# Altium footprint library Regulators.PcbLib: 16 footprints
Each footprint in its own frame and in the unit in brackets; x right, y up, seen from the top. Pads: shape width x height; smd on the part's side, far side on the other; paste and mask are expansions set on the pad; w line width, h text height; cw(c..) or ccw(c..) is an arc to the next point about the centre after c.
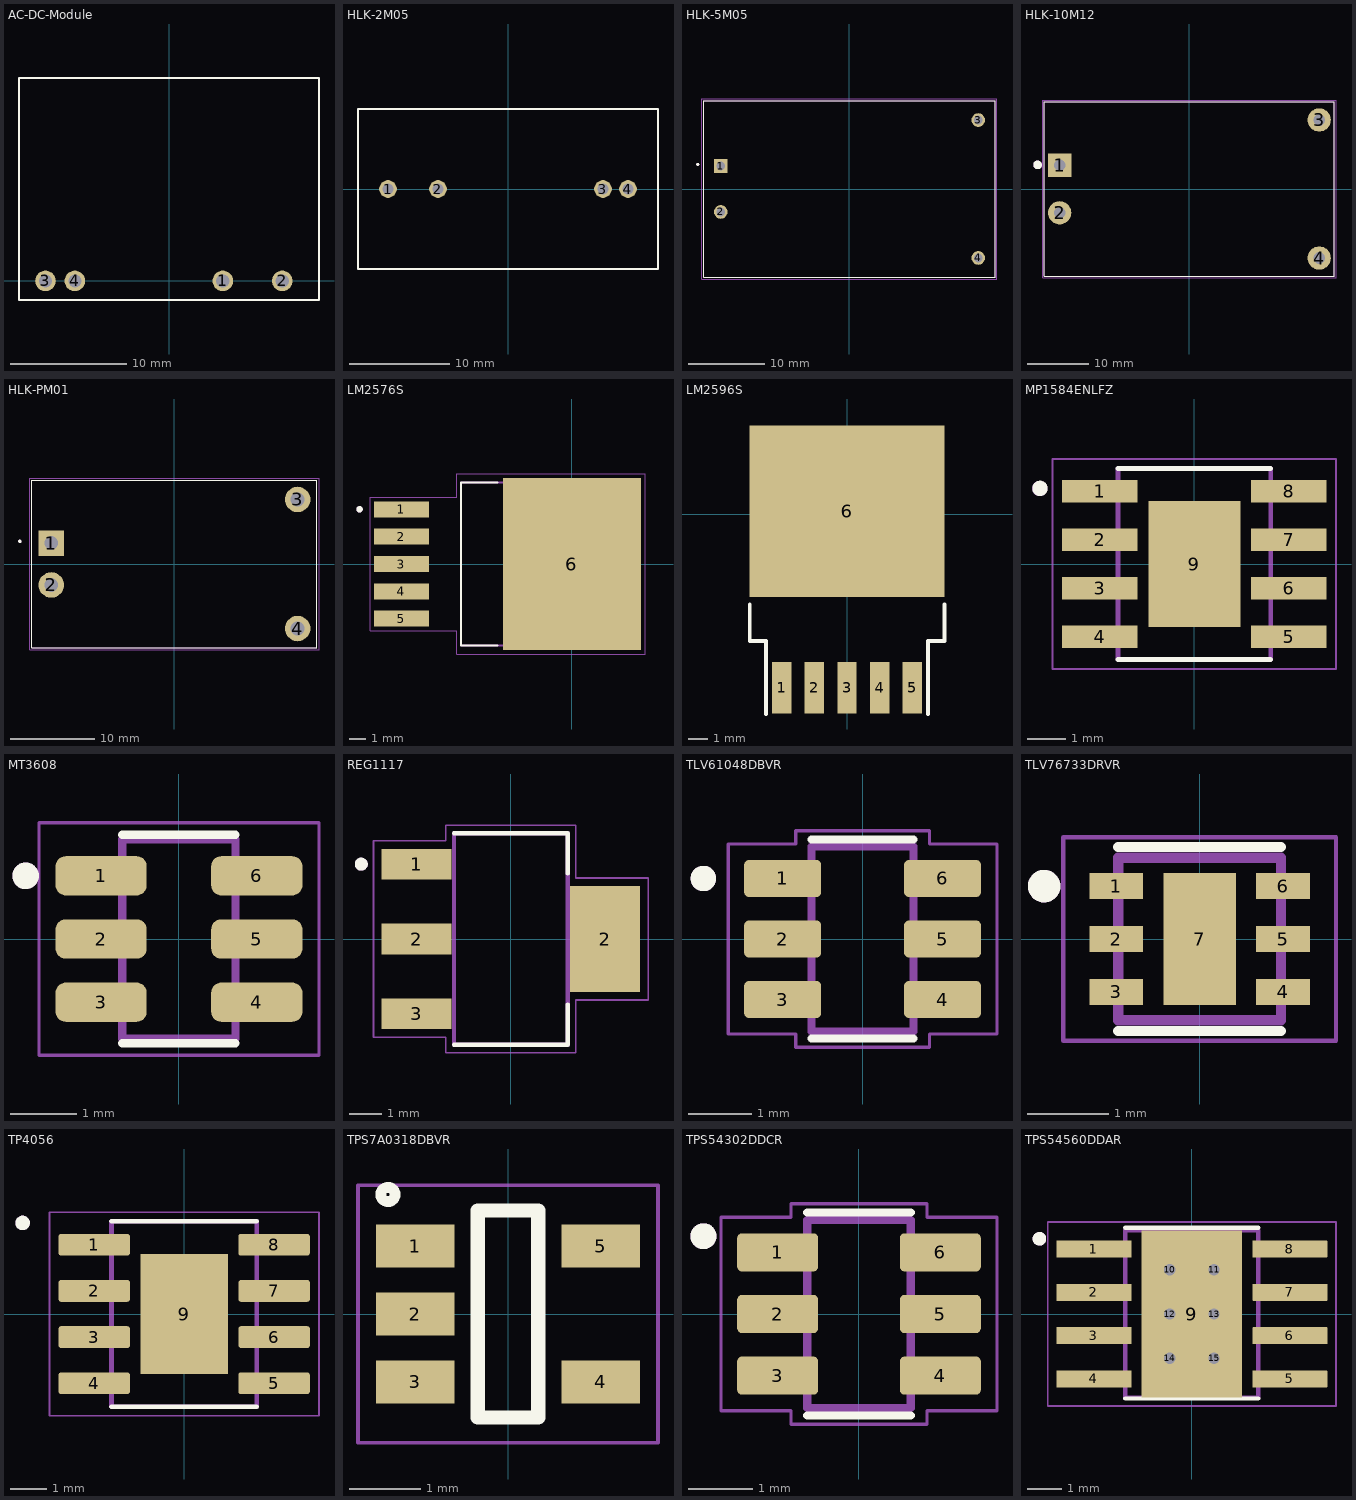
[diagram p0: the footprints below, top view; thin cyan lines are the x and y axes]

## AC-DC-Module [mil] "AC DC Module 12V 450mA - Type A"
pads (4):
  round 70 hole 45: 1(182.94,-0.08) 2(385,0) 3(-420,0) 4(-320,0)
Top Overlay:
  lines w7.87: -510,-65 510,-65 510,690 -510,690 -510,-65
3D body "WX-DC12003_.STEP": height 528.15, standoff 4.53, extent -494.75,-49.41 494.75,675

## HLK-2M05 [mil]
pads (4):
  round 70 hole 45: 1(-472.44,0) 2(-275.59,0) 3(374.02,0) 4(472.44,0)
Top Overlay:
  lines w7.87: -590.55,-314.96 -590.55,314.96 590.55,314.96 590.55,-314.96 -590.55,-314.96
3D body "HLK-2Mxx.step": height 748.03, standoff -196.85, extent -590.55,-315 590.55,314.92

## HLK-5M05 [mil]
pads (4):
  rect 70x70 hole 45: 1(-661.42,118.11)
  round 70 hole 45: 2(-661.42,-118.11) 3(661.42,354.33) 4(661.42,-354.33)
Top Overlay:
  circle w7.87: c-779.53,125.98 r3.94
  lines w5: -748.03,-452.76 748.03,-452.76 748.03,452.76 -748.03,452.76 -748.03,-452.76
Bottom Overlay:
  text "AC1" at -430,95 h60
  text "AC2" at -430,-145 h60
  text "VO-" at 590,325 h60
  text "VO+" at 590,-390 h60
Mechanical 13:
  circle w7.87: c-779.53,125.98 r3.94
  lines w5: -748.03,-452.76 -748.03,452.76 748.03,452.76 748.03,-452.76 -748.03,-452.76
Mechanical 15:
  lines w1.97: -757.87,-462.6 -757.87,462.6 757.87,462.6 757.87,-462.6 -757.87,-462.6
3D body "step_temp.STEP": height 709.51, standoff -196, extent -748.03,-452.76 748.03,452.76

## HLK-10M12 [mm]
height 22
pads (4):
  rect 3.81x3.81 hole 1.905: 1(-21.25,3.9)
  round 3.81 hole 1.905: 2(-21.25,-3.9) 3(21.25,11.3) 4(21.25,-11.3)
Top Overlay:
  circle w0.889: c-24.865,3.937 r0.254
  lines w0.127: -23.75,-14.25 -23.75,14.25 23.75,14.25 23.75,-14.25 -23.75,-14.25
Bottom Overlay:
  text "VO+" at 18.288,-12.192 h1.52
  text "VO-" at 18.288,10.668 h1.52
  text "AC2" at -14.351,-4.826 h1.52
  text "AC1" at -14.351,3.048 h1.52
Mechanical 13:
  circle w0.889: c-24.865,3.937 r0.254
  lines w0.127: -23.75,-14.25 -23.75,14.25 23.75,14.25 23.75,-14.25 -23.75,-14.25
Mechanical 15:
  lines w0.05: -24,-14.5 24,-14.5 24,14.5 -24,14.5 -24,-14.5
3D body "step_temp.STEP": height 22, standoff -5, extent -23.75,-14.25 23.75,14.25

## HLK-PM01 [mil] "HLK-PM01"
height 590.55
pads (4):
  rect 120x120 hole 65: 1(-578.74,98.43)
  round 120 hole 65: 2(-578.74,-98.43) 3(578.74,303.15) 4(578.74,-303.15)
Top Overlay:
  circle w7.87: c-726.39,106.3 r3.94
  lines w5: -669.29,-393.7 669.29,-393.7 669.29,393.7 -669.29,393.7 -669.29,-393.7
Bottom Overlay:
  text "VO+" at 480,-335 h60
  text "VO-" at 480,275 h60
  text "AC2" at -320,-125 h60
  text "AC1" at -320,70 h60
Mechanical 13:
  circle w7.87: c-726.39,106.3 r3.94
  lines w5: -669.29,-393.7 669.29,-393.7 669.29,393.7 -669.29,393.7 -669.29,-393.7
Mechanical 15:
  lines w1.97: -679.13,-403.54 679.13,-403.54 679.13,403.54 -679.13,403.54 -679.13,-403.54
3D body "step_temp.STEP": height 590.55, standoff -196.85, extent -669.29,-397.64 669.29,397.64

## LM2576S [mm] "LM2576S"
pads (6):
  rect 3.4x1 smd paste-0.05 mask+0.07: 1(-10.6,3.4) 2(-10.6,1.7) 3(-10.6,0) 4(-10.6,-1.7) 5(-10.6,-3.4)
  rect 8.6x10.7 smd paste-0.05 mask+0.07: 6(0,0)
Top Overlay:
  circle w0.2: c-13.2,3.4 r0.1
  lines w0.127: -4.62,-5.08 -6.905,-5.08 -6.905,5.08 -4.62,5.08
Mechanical 13:
  circle w0.2: c-13.2,3.4 r0.1
  lines w0.127: -6.905,-5.08 -6.905,5.08 2.02,5.08 2.02,-5.08 -6.905,-5.08
Mechanical 15:
  lines w0.05: -12.55,-4.15 -7.155,-4.15 -7.155,-5.6 4.55,-5.6 4.55,5.6 -7.155,5.6 -7.155,4.15 -12.55,4.15 -12.55,-4.15
3D body "step_temp.STEP": height 4.8, standoff 0, extent -10.986,-5.08 3.365,5.08

## LM2596S [mil] "TO170P1435X465-6N"
pads (6):
  rect 40x106 smd: 1(-134,-356) 2(-67,-356) 3(0,-356) 4(67,-356) 5(134,-356)
  rect 400x352 smd: 6(0,6)
Top Overlay:
  lines w8: -199.78,-185 -199.78,-260 -166.47,-260 -166.47,-410 ; 166.27,-410 166.27,-260 200,-260 200,-185
3D body "step_temp.STEP": height 183.07, standoff -5.91, extent -200,-382.48 200,182.48

## MP1584ENLFZ [mm] "SOIC127P600X170-9N"
pads (9):
  rect 1.97x0.6 smd: 1(-2.475,1.905) 2(-2.475,0.635) 3(-2.475,-0.635) 4(-2.475,-1.905) 5(2.475,-1.905) 6(2.475,-0.635) 7(2.475,0.635) 8(2.475,1.905)
  rect 2.41x3.3 smd paste-3: 9(0,0)
Top Overlay:
  circle w0.2: c-4.04,1.98 r0.1
  lines w0.127: -2,-2.5 2,-2.5 ; -2,2.5 2,2.5
Top Paste:
  region: 0.762,-1.042 -0.763,-1.042 -0.763,1.04 0.762,1.04
Mechanical 13:
  circle w0.2: c-4.044,1.977 r0.1
  lines w0.127: -2,-2.5 -2,2.5 2,2.5 2,-2.5 -2,-2.5
Mechanical 15:
  lines w0.05: -3.71,-2.75 -3.71,2.75 3.71,2.75 3.71,-2.75 -3.71,-2.75
3D body "step_temp.STEP": height 1.7, standoff 0, extent -3,-2.45 3,2.45

## MT3608 [mm] "SOT95P280X145-6N"
height 1.45
pads (6):
  rrect50% 1.37x0.59 smd: 1(-1.17,0.95) 2(-1.17,0) 3(-1.17,-0.95) 4(1.17,-0.95) 5(1.17,0) 6(1.17,0.95)
Top Overlay:
  circle w0.2: c-2.305,0.95 r0.1
  lines w0.127: -0.85,-1.565 0.85,-1.565 ; -0.85,1.565 0.85,1.565
Mechanical 13:
  circle w0.2: c-2.305,0.95 r0.1
  lines w0.127: -0.85,-1.5 -0.85,1.5 0.85,1.5 0.85,-1.5 -0.85,-1.5
Mechanical 15:
  lines w0.05: -2.105,-1.75 -2.105,1.75 2.105,1.75 2.105,-1.75 -2.105,-1.75
3D body "step_temp.STEP": height 1.45, standoff 0, extent -1.4,-1.45 1.4,1.45

## REG1117 [mm] "SOT230P700X180-4N"
pads (4):
  rect 2.15x0.95 smd: 1(-2.9,2.3) 2(-2.9,0) 3(-2.9,-2.3)
  rect 2.15x3.25 smd: 2(2.9,0)
Top Overlay:
  circle w0.2: c-4.6,2.3 r0.1
  lines w0.127: -1.75,-3.25 1.75,-3.25 1.75,-2.01 ; -1.75,3.25 1.75,3.25 1.75,2.01
Mechanical 13:
  circle w0.2: c-4.6,2.3 r0.1
  lines w0.127: -1.75,-3.25 -1.75,3.25 1.75,3.25 1.75,-3.25 -1.75,-3.25
Mechanical 15:
  lines w0.05: -4.225,-3.025 -4.225,3.025 -2,3.025 -2,3.5 2,3.5 2,1.875 4.225,1.875 4.225,-1.875 2,-1.875 2,-3.5 -2,-3.5 -2,-3.025 -4.225,-3.025
3D body "REG1117.STEP": height 1.8, standoff 0, extent -3.499,-3.25 3.499,3.25

## TLV61048DBVR [mm] "SOT95P280X145-6N"
pads (6):
  rrect25% 1.21x0.58 smd: 1(-1.255,0.95) 2(-1.255,0) 3(-1.255,-0.95) 4(1.255,-0.95) 5(1.255,0) 6(1.255,0.95)
Top Overlay:
  circle w0.2: c-2.5,0.95 r0.1
  lines w0.127: -0.8,-1.56 0.8,-1.56 ; -0.8,1.56 0.8,1.56
Mechanical 13:
  circle w0.2: c-2.5,0.95 r0.1
  lines w0.127: -0.8,-1.45 0.8,-1.45 0.8,1.45 -0.8,1.45 -0.8,-1.45
Mechanical 15:
  lines w0.05: -2.11,-1.49 -1.05,-1.49 -1.05,-1.7 1.05,-1.7 1.05,-1.49 2.11,-1.49 2.11,1.49 1.05,1.49 1.05,1.7 -1.05,1.7 -1.05,1.49 -2.11,1.49 -2.11,-1.49
3D body "step_temp.STEP": height 1.45, standoff 0, extent -1.4,-1.45 1.4,1.45

## TLV76733DRVR [mm] "SON65P200X200X80-7N"
pads (7):
  rect 0.66x0.32 smd: 1(-1.025,0.65) 2(-1.025,0) 3(-1.025,-0.65) 4(1.025,-0.65) 5(1.025,0) 6(1.025,0.65)
  rect 0.889x1.626 smd paste-2: 7(0,0)
Top Overlay:
  circle w0.2: c-1.91,0.65 r0.1
  lines w0.127: -1,-1.13 1,-1.13 ; -1,1.13 1,1.13
Mechanical 13:
  circle w0.2: c-1.91,0.65 r0.1
  lines w0.127: -1,-1 1,-1 1,1 -1,1 -1,-1
Mechanical 15:
  lines w0.05: -1.675,-1.25 1.675,-1.25 1.675,1.25 -1.675,1.25 -1.675,-1.25
3D body "step_temp.STEP": height 0.8, standoff 0, extent -1,-1 1,1

## TP4056 [mm] "SOP127P600X175-9N"
height 1.75
pads (9):
  rrect25% 1.97x0.6 smd: 1(-2.475,1.905) 2(-2.475,0.635) 3(-2.475,-0.635) 4(-2.475,-1.905) 5(2.475,-1.905) 6(2.475,-0.635) 7(2.475,0.635) 8(2.475,1.905)
  rect 2.413x3.302 smd paste-3: 9(0,0)
Top Overlay:
  circle w0.2: c-4.445,2.505 r0.1
  lines w0.127: -2,-2.55 2,-2.55 ; -2,2.55 2,2.55
Top Paste:
  region: 0.645,-0.82 -0.645,-0.82 -0.645,0.82 0.645,0.82
Mechanical 13:
  circle w0.2: c-4.445,2.505 r0.1
  lines w0.127: -2,-2.55 -2,2.55 2,2.55 2,-2.55 -2,-2.55
Mechanical 15:
  lines w0.05: -3.71,-2.8 -3.71,2.8 3.71,2.8 3.71,-2.8 -3.71,-2.8
3D body "step_temp.STEP": height 1.75, standoff 0, extent -3,-2.45 3,2.45

## TPS7A0318DBVR [mm] "SOT95P280X145-5N"
pads (5):
  rect 1.1x0.6 smd: 1(-1.3,0.95) 2(-1.3,0) 3(-1.3,-0.95) 4(1.3,-0.95) 5(1.3,0.95)
Top Overlay:
  circle w0.15: c-1.68,1.673 r0.1
  lines w0.2: -0.425,-1.45 -0.425,1.45 0.425,1.45 0.425,-1.45 -0.425,-1.45
Mechanical 15:
  lines w0.05: -2.1,-1.8 -2.1,1.8 2.1,1.8 2.1,-1.8 -2.1,-1.8
3D body "step_temp.STEP": height 1.45, standoff 0, extent -1.35,-1.45 1.35,1.45

## TPS54302DDCR [mm] "SOT95P280X110-6N"
height 1.1
pads (6):
  rrect25% 1.25x0.59 smd: 1(-1.255,0.95) 2(-1.255,0) 3(-1.255,-0.95) 4(1.255,-0.95) 5(1.255,0) 6(1.255,0.95)
Top Overlay:
  circle w0.2: c-2.4,1.2 r0.1
  lines w0.127: -0.8,-1.565 0.8,-1.565 ; -0.8,1.565 0.8,1.565
Mechanical 13:
  circle w0.2: c-2.4,1.2 r0.1
  lines w0.127: -0.8,-1.45 -0.8,1.45 0.8,1.45 0.8,-1.45 -0.8,-1.45
Mechanical 15:
  lines w0.05: -2.13,-1.495 -2.13,1.495 -1.05,1.495 -1.05,1.7 1.05,1.7 1.05,1.495 2.13,1.495 2.13,-1.495 1.05,-1.495 1.05,-1.7 -1.05,-1.7 -1.05,-1.495 -2.13,-1.495
3D body "step_temp.STEP": height 1.1, standoff 0, extent -1.4,-1.45 1.4,1.45

## TPS54560DDAR [mm] "TPS54560DDAR"
pads (15):
  rect 2.2x0.5 smd paste-2 mask+0: 1(-2.875,1.905) 2(-2.875,0.635) 3(-2.875,-0.635) 4(-2.875,-1.905)
  rrect10% 2.2x0.5 smd paste-2 mask+0: 5(2.875,-1.905) 6(2.875,-0.635) 7(2.875,0.635) 8(2.875,1.905)
  rect 2.95x4.9 smd paste-3 mask+0: 9(0,0)
  round 0.43 hole 0.33 mask+0: 10(-0.65,1.3) 11(0.65,1.3) 12(-0.65,0) 13(0.65,0) 14(-0.65,-1.3) 15(0.65,-1.3)
Top Overlay:
  circle w0.2: c-4.47,2.205 r0.1
  lines w0.127: -1.95,-2.475 1.95,-2.475 ; -1.95,2.525 1.95,2.525
Top Paste:
  region: 1.2,-1.55 -1.2,-1.55 -1.2,1.55 1.2,1.55
  region: -1.8,1.68 -3.95,1.68 -3.95,2.13 -1.8,2.13
  region: -1.8,0.41 -3.95,0.41 -3.95,0.86 -1.8,0.86
  region: -1.8,-0.86 -3.95,-0.86 -3.95,-0.41 -1.8,-0.41
  region: -1.8,-2.13 -3.95,-2.13 -3.95,-1.68 -1.8,-1.68
  region: 3.95,1.68 1.8,1.68 1.8,2.13 3.95,2.13
  region: 3.95,0.41 1.8,0.41 1.8,0.86 3.95,0.86
  region: 3.95,-0.86 1.8,-0.86 1.8,-0.41 3.95,-0.41
  region: 3.95,-2.13 1.8,-2.13 1.8,-1.68 3.95,-1.68
Top Solder:
  region: 1.2,-1.55 -1.2,-1.55 -1.2,1.55 1.2,1.55
  region: -1.705,1.585 -4.045,1.585 -4.045,2.225 -1.705,2.225
  region: -1.705,0.315 -4.045,0.315 -4.045,0.955 -1.705,0.955
  region: -1.705,-0.955 -4.045,-0.955 -4.045,-0.315 -1.705,-0.315
  region: -1.705,-2.225 -4.045,-2.225 -4.045,-1.585 -1.705,-1.585
  region: 4.045,1.585 1.705,1.585 1.705,2.225 4.045,2.225
  region: 4.045,0.315 1.705,0.315 1.705,0.955 4.045,0.955
  region: 4.045,-0.955 1.705,-0.955 1.705,-0.315 4.045,-0.315
  region: 4.045,-2.225 1.705,-2.225 1.705,-1.585 4.045,-1.585
Mechanical 13:
  circle w0.2: c-4.47,2.205 r0.1
  lines w0.127: -1.95,-2.45 1.95,-2.45 1.95,2.45 -1.95,2.45 -1.95,-2.45
Mechanical 15:
  lines w0.05: -4.225,-2.7 4.225,-2.7 4.225,2.7 -4.225,2.7 -4.225,-2.7
3D body "step_temp.STEP": height 1.7, standoff 0, extent -3,-2.45 3,2.45